# Altium integrated library CRGCQ0402F470K.IntLib: 1 symbol
Pins are listed as number, name and electrical type; pins without a type are passive.

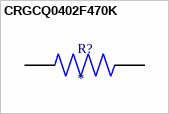
[diagram p0: symbol CRGCQ0402F470K]

## CRGCQ0402F470K
designator R?
Fixed Resistor CRGCQ 0402 470K 1%; MP: CRGCQ0402F470K; Package: None; Price: None; Value: *; Availability: Unavailable
footprint RESC1005X40N
pins: 1, 2